# Altium footprint library WR-TBL_Pluggable Connector_5.08mm.PcbLib: 295 footprints (part 8 of 19)
Each footprint in its own frame and in the unit in brackets; x right, y up, seen from the top. Pads: shape width x height; smd on the part's side, far side on the other; paste and mask are expansions set on the pad; w line width, h text height; cw(c..) or ccw(c..) is an arc to the next point about the centre after c.
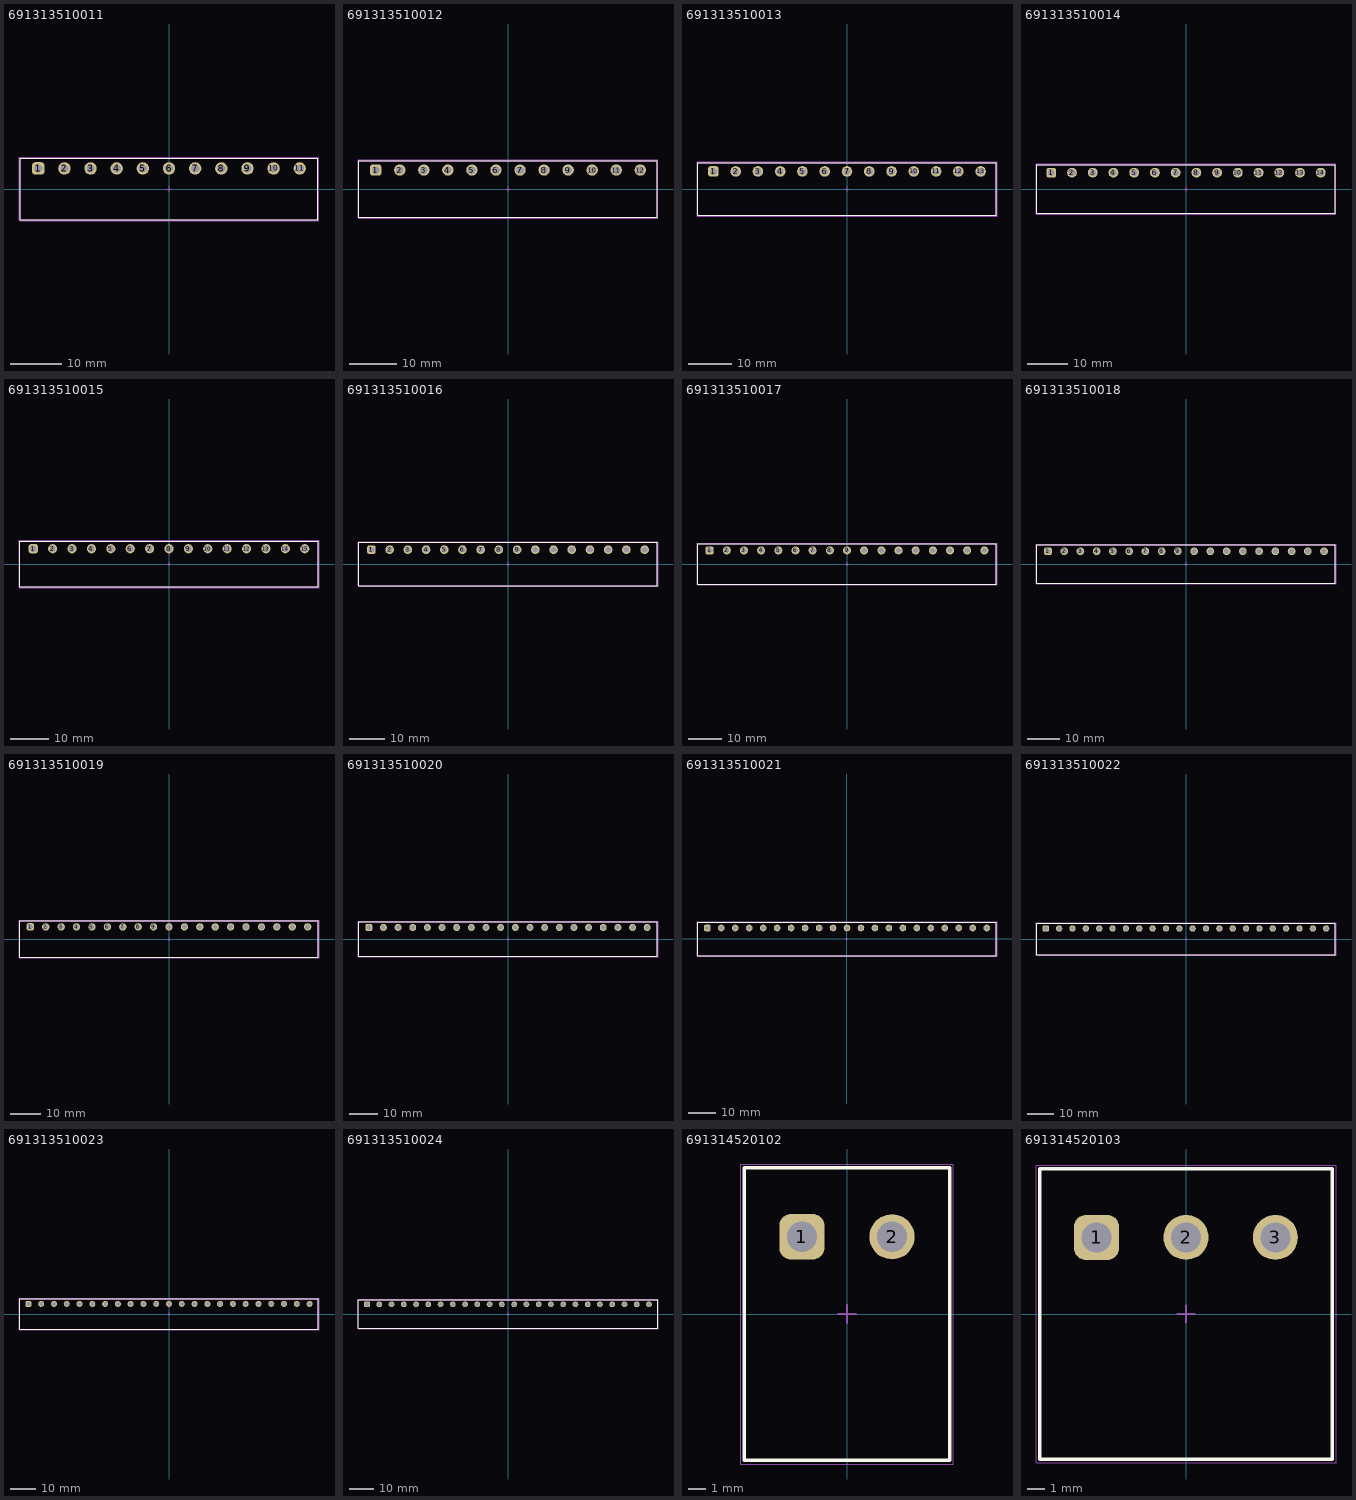
[diagram p7: the footprints below, top view; thin cyan lines are the x and y axes]

## 691313510011 [mm] "5,08mm - PCB Headers - Horizontal - Closed ends - 11p"
height 8.5
pads (11):
  rrect50% 2.4x2.4 hole 1.6: 1(-25.4,4)
  round 2.4 hole 1.6: 2(-20.32,4) 3(-15.24,4) 4(-10.16,4) 5(-5.08,4) 6(0,4) 7(5.08,4) 8(10.16,4) 9(15.24,4) 10(20.32,4) 11(25.4,4)
Top Overlay:
  lines w0.2: -28.94,-6 -28.94,6 28.94,6 28.94,-6 -28.94,-6
Top Assembly:
  lines w0.1: -28.94,-6 28.94,-6 28.94,6 -28.94,6 -28.94,-6
Top Designator:
  text ".Designator" at -3.647,-0.357 h1
Top 3D Body:
  lines w0.1: -28.94,-6 -28.94,6 28.94,6 28.94,-6 -28.94,-6
Top Courtyard:
  lines w0.05: -29.14,-6.2 -29.14,6.2 29.14,6.2 29.14,-6.2 -29.14,-6.2
Top Component Center:
  lines w0.1: -0.5,0 0.5,0 ; 0,-0.5 0,0.5
3D body "691313510011.stp": height 8.55, standoff -3.45, extent -28.94,-6 28.94,6

## 691313510012 [mm] "5,08mm - PCB Headers - Horizontal - Closed ends - 12p"
height 8.5
pads (12):
  rrect50% 2.4x2.4 hole 1.6: 1(-27.94,4)
  round 2.4 hole 1.6: 2(-22.86,4) 3(-17.78,4) 4(-12.7,4) 5(-7.62,4) 6(-2.54,4) 7(2.54,4) 8(7.62,4) 9(12.7,4) 10(17.78,4) 11(22.86,4) 12(27.94,4)
Top Overlay:
  lines w0.2: -31.48,-6 31.48,-6 31.48,6 -31.48,6 -31.48,-6
Top Assembly:
  lines w0.1: -31.48,-6 -31.48,6 31.48,6 31.48,-6 -31.48,-6
Top Designator:
  text ".Designator" at -3.647,-0.357 h1
Top 3D Body:
  lines w0.1: -31.48,-6 31.48,-6 31.48,6 -31.48,6 -31.48,-6
Top Courtyard:
  lines w0.05: -31.68,-6.2 31.68,-6.2 31.68,6.2 -31.68,6.2 -31.68,-6.2
Top Component Center:
  lines w0.1: -0.5,0 0.5,0 ; 0,-0.5 0,0.5
3D body "691313510012.stp": height 8.55, standoff -3.45, extent -31.48,-6 31.48,6

## 691313510013 [mm] "5,08mm - PCB Headers - Horizontal - Closed ends - 13p"
height 8.5
pads (13):
  rrect50% 2.4x2.4 hole 1.6: 1(-30.48,4)
  round 2.4 hole 1.6: 2(-25.4,4) 3(-20.32,4) 4(-15.24,4) 5(-10.16,4) 6(-5.08,4) 7(0,4) 8(5.08,4) 9(10.16,4) 10(15.24,4) 11(20.32,4) 12(25.4,4) 13(30.48,4)
Top Overlay:
  lines w0.2: -34.02,-6 -34.02,6 34.02,6 34.02,-6 -34.02,-6
Top Assembly:
  lines w0.1: -34.02,-6 34.02,-6 34.02,6 -34.02,6 -34.02,-6
Top Designator:
  text ".Designator" at -3.647,-0.357 h1
Top 3D Body:
  lines w0.1: -34.02,-6 -34.02,6 34.02,6 34.02,-6 -34.02,-6
Top Courtyard:
  lines w0.05: -34.22,-6.2 -34.22,6.2 34.22,6.2 34.22,-6.2 -34.22,-6.2
Top Component Center:
  lines w0.1: -0.5,0 0.5,0 ; 0,-0.5 0,0.5
3D body "691313510013.stp": height 8.55, standoff -3.45, extent -34.02,-6 34.02,6

## 691313510014 [mm] "5,08mm - PCB Headers - Horizontal - Closed ends - 14p"
height 8.5
pads (14):
  rrect50% 2.4x2.4 hole 1.6: 1(-33.02,4)
  round 2.4 hole 1.6: 2(-27.94,4) 3(-22.86,4) 4(-17.78,4) 5(-12.7,4) 6(-7.62,4) 7(-2.54,4) 8(2.54,4) 9(7.62,4) 10(12.7,4) 11(17.78,4) 12(22.86,4) 13(27.94,4) 14(33.02,4)
Top Overlay:
  lines w0.2: -36.56,-6 36.56,-6 36.56,6 -36.56,6 -36.56,-6
Top Assembly:
  lines w0.1: -36.56,-6 -36.56,6 36.56,6 36.56,-6 -36.56,-6
Top Designator:
  text ".Designator" at -3.647,-0.357 h1
Top 3D Body:
  lines w0.1: -36.56,-6 36.56,-6 36.56,6 -36.56,6 -36.56,-6
Top Courtyard:
  lines w0.05: -36.76,-6.2 36.76,-6.2 36.76,6.2 -36.76,6.2 -36.76,-6.2
Top Component Center:
  lines w0.1: -0.5,0 0.5,0 ; 0,-0.5 0,0.5
3D body "691313510014.stp": height 8.55, standoff -3.45, extent -36.56,-6 36.56,6

## 691313510015 [mm] "5,08mm - PCB Headers - Horizontal - Closed ends - 15p"
height 8.5
pads (15):
  rrect50% 2.4x2.4 hole 1.6: 1(-35.56,4)
  round 2.4 hole 1.6: 2(-30.48,4) 3(-25.4,4) 4(-20.32,4) 5(-15.24,4) 6(-10.16,4) 7(-5.08,4) 8(0,4) 9(5.08,4) 10(10.16,4) 11(15.24,4) 12(20.32,4) 13(25.4,4) 14(30.48,4) 15(35.56,4)
Top Overlay:
  lines w0.2: -39.1,-6 39.1,-6 39.1,6 -39.1,6 -39.1,-6
Top Assembly:
  lines w0.1: -39.1,-6 -39.1,6 39.1,6 39.1,-6 -39.1,-6
Top Designator:
  text ".Designator" at -3.647,-0.357 h1
Top 3D Body:
  lines w0.1: -39.1,-6 39.1,-6 39.1,6 -39.1,6 -39.1,-6
Top Courtyard:
  lines w0.05: -39.3,-6.2 39.3,-6.2 39.3,6.2 -39.3,6.2 -39.3,-6.2
Top Component Center:
  lines w0.1: -0.5,0 0.5,0 ; 0,-0.5 0,0.5
3D body "691313510015.stp": height 8.55, standoff -3.45, extent -39.1,-6 39.1,6

## 691313510016 [mm] "5,08mm - PCB Headers - Horizontal - Closed ends - 16p"
height 8.5
pads (16):
  rrect50% 2.4x2.4 hole 1.6: 1(-38.1,4)
  round 2.4 hole 1.6: 2(-33.02,4) 3(-27.94,4) 4(-22.86,4) 5(-17.78,4) 6(-12.7,4) 7(-7.62,4) 8(-2.54,4) 9(2.54,4) 10(7.62,4) 11(12.7,4) 12(17.78,4) 13(22.86,4) 14(27.94,4) 15(33.02,4) 16(38.1,4)
Top Overlay:
  lines w0.2: -41.64,-6 41.64,-6 41.64,6 -41.64,6 -41.64,-6
Top Assembly:
  lines w0.1: -41.64,-6 -41.64,6 41.64,6 41.64,-6 -41.64,-6
Top Designator:
  text ".Designator" at -3.647,-0.357 h1
Top 3D Body:
  lines w0.1: -41.64,-6 41.64,-6 41.64,6 -41.64,6 -41.64,-6
Top Courtyard:
  lines w0.05: -41.84,-6.2 41.84,-6.2 41.84,6.2 -41.84,6.2 -41.84,-6.2
Top Component Center:
  lines w0.1: -0.5,0 0.5,0 ; 0,-0.5 0,0.5
3D body "691313510016.stp": height 8.55, standoff -3.45, extent -41.64,-6 41.64,6

## 691313510017 [mm] "5,08mm - PCB Headers - Horizontal - Closed ends - 17p"
height 8.5
pads (17):
  rrect50% 2.4x2.4 hole 1.6: 1(-40.64,4)
  round 2.4 hole 1.6: 2(-35.56,4) 3(-30.48,4) 4(-25.4,4) 5(-20.32,4) 6(-15.24,4) 7(-10.16,4) 8(-5.08,4) 9(0,4) 10(5.08,4) 11(10.16,4) 12(15.24,4) 13(20.32,4) 14(25.4,4) 15(30.48,4) 16(35.56,4) 17(40.64,4)
Top Overlay:
  lines w0.2: -44.18,-6 -44.18,6 44.18,6 44.18,-6 -44.18,-6
Top Assembly:
  lines w0.1: -44.18,-6 44.18,-6 44.18,6 -44.18,6 -44.18,-6
Top Designator:
  text ".Designator" at -3.647,-0.357 h1
Top 3D Body:
  lines w0.1: -44.18,-6 -44.18,6 44.18,6 44.18,-6 -44.18,-6
Top Courtyard:
  lines w0.05: -44.38,-6.2 -44.38,6.2 44.38,6.2 44.38,-6.2 -44.38,-6.2
Top Component Center:
  lines w0.1: -0.5,0 0.5,0 ; 0,-0.5 0,0.5
3D body "691313510017.stp": height 8.55, standoff -3.45, extent -44.18,-6 44.18,6

## 691313510018 [mm] "5,08mm - PCB Headers - Horizontal - Closed ends - 18p"
height 8.5
pads (18):
  rrect50% 2.4x2.4 hole 1.6: 1(-43.18,4)
  round 2.4 hole 1.6: 2(-38.1,4) 3(-33.02,4) 4(-27.94,4) 5(-22.86,4) 6(-17.78,4) 7(-12.7,4) 8(-7.62,4) 9(-2.54,4) 10(2.54,4) 11(7.62,4) 12(12.7,4) 13(17.78,4) 14(22.86,4) 15(27.94,4) 16(33.02,4) 17(38.1,4) 18(43.18,4)
Top Overlay:
  lines w0.2: -46.72,-6 -46.72,6 46.72,6 46.72,-6 -46.72,-6
Top Assembly:
  lines w0.1: -46.72,-6 46.72,-6 46.72,6 -46.72,6 -46.72,-6
Top Designator:
  text ".Designator" at -3.647,-0.357 h1
Top 3D Body:
  lines w0.1: -46.72,-6 -46.72,6 46.72,6 46.72,-6 -46.72,-6
Top Courtyard:
  lines w0.05: -46.92,-6.2 -46.92,6.2 46.92,6.2 46.92,-6.2 -46.92,-6.2
Top Component Center:
  lines w0.1: -0.5,0 0.5,0 ; 0,-0.5 0,0.5
3D body "691313510018.stp": height 8.55, standoff -3.45, extent -46.72,-6 46.72,6

## 691313510019 [mm] "5,08mm - PCB Headers - Horizontal - Closed ends - 19p"
height 8.5
pads (19):
  rrect50% 2.4x2.4 hole 1.6: 1(-45.72,4)
  round 2.4 hole 1.6: 2(-40.64,4) 3(-35.56,4) 4(-30.48,4) 5(-25.4,4) 6(-20.32,4) 7(-15.24,4) 8(-10.16,4) 9(-5.08,4) 10(0,4) 11(5.08,4) 12(10.16,4) 13(15.24,4) 14(20.32,4) 15(25.4,4) 16(30.48,4) 17(35.56,4) 18(40.64,4) 19(45.72,4)
Top Overlay:
  lines w0.2: -49.26,-6 -49.26,6 49.26,6 49.26,-6 -49.26,-6
Top Assembly:
  lines w0.1: -49.26,-6 49.26,-6 49.26,6 -49.26,6 -49.26,-6
Top Designator:
  text ".Designator" at -3.647,-0.357 h1
Top 3D Body:
  lines w0.1: -49.26,-6 -49.26,6 49.26,6 49.26,-6 -49.26,-6
Top Courtyard:
  lines w0.05: -49.46,-6.2 -49.46,6.2 49.46,6.2 49.46,-6.2 -49.46,-6.2
Top Component Center:
  lines w0.1: -0.5,0 0.5,0 ; 0,-0.5 0,0.5
3D body "691313510019.stp": height 8.55, standoff -3.45, extent -49.26,-6 49.26,6

## 691313510020 [mm] "5,08mm - PCB Headers - Horizontal - Closed ends - 20p"
height 8.5
pads (20):
  rrect50% 2.4x2.4 hole 1.6: 1(-48.26,4)
  round 2.4 hole 1.6: 2(-43.18,4) 3(-38.1,4) 4(-33.02,4) 5(-27.94,4) 6(-22.86,4) 7(-17.78,4) 8(-12.7,4) 9(-7.62,4) 10(-2.54,4) 11(2.54,4) 12(7.62,4) 13(12.7,4) 14(17.78,4) 15(22.86,4) 16(27.94,4) 17(33.02,4) 18(38.1,4) 19(43.18,4) 20(48.26,4)
Top Overlay:
  lines w0.2: -51.8,-6 -51.8,6 51.8,6 51.8,-6 -51.8,-6
Top Assembly:
  lines w0.1: -51.8,-6 51.8,-6 51.8,6 -51.8,6 -51.8,-6
Top Designator:
  text ".Designator" at -3.647,-0.357 h1
Top 3D Body:
  lines w0.1: -51.8,-6 -51.8,6 51.8,6 51.8,-6 -51.8,-6
Top Courtyard:
  lines w0.05: -52,-6.2 -52,6.2 52,6.2 52,-6.2 -52,-6.2
Top Component Center:
  lines w0.1: -0.5,0 0.5,0 ; 0,-0.5 0,0.5
3D body "691313510020.stp": height 8.55, standoff -3.45, extent -51.8,-6 51.8,6

## 691313510021 [mm] "5,08mm - PCB Headers - Horizontal - Closed ends - 21p"
height 8.5
pads (21):
  rrect50% 2.4x2.4 hole 1.6: 1(-50.8,4)
  round 2.4 hole 1.6: 2(-45.72,4) 3(-40.64,4) 4(-35.56,4) 5(-30.48,4) 6(-25.4,4) 7(-20.32,4) 8(-15.24,4) 9(-10.16,4) 10(-5.08,4) 11(0,4) 12(5.08,4) 13(10.16,4) 14(15.24,4) 15(20.32,4) 16(25.4,4) 17(30.48,4) 18(35.56,4) 19(40.64,4) 20(45.72,4) 21(50.8,4)
Top Overlay:
  lines w0.2: -54.34,-6 54.34,-6 54.34,6 -54.34,6 -54.34,-6
Top Assembly:
  lines w0.1: -54.34,-6 -54.34,6 54.34,6 54.34,-6 -54.34,-6
Top Designator:
  text ".Designator" at -3.647,-0.357 h1
Top 3D Body:
  lines w0.1: -54.34,-6 54.34,-6 54.34,6 -54.34,6 -54.34,-6
Top Courtyard:
  lines w0.05: -54.54,-6.2 54.54,-6.2 54.54,6.2 -54.54,6.2 -54.54,-6.2
Top Component Center:
  lines w0.1: -0.5,0 0.5,0 ; 0,-0.5 0,0.5
3D body "691313510021.stp": height 8.55, standoff -3.45, extent -54.34,-6 54.34,6

## 691313510022 [mm] "5,08mm - PCB Headers - Horizontal - Closed ends - 22p"
height 8.5
pads (22):
  rrect50% 2.4x2.4 hole 1.6: 1(-53.34,4)
  round 2.4 hole 1.6: 2(-48.26,4) 3(-43.18,4) 4(-38.1,4) 5(-33.02,4) 6(-27.94,4) 7(-22.86,4) 8(-17.78,4) 9(-12.7,4) 10(-7.62,4) 11(-2.54,4) 12(2.54,4) 13(7.62,4) 14(12.7,4) 15(17.78,4) 16(22.86,4) 17(27.94,4) 18(33.02,4) 19(38.1,4) 20(43.18,4) 21(48.26,4) 22(53.34,4)
Top Overlay:
  lines w0.2: -56.88,-6 -56.88,6 56.88,6 56.88,-6 -56.88,-6
Top Assembly:
  lines w0.1: -56.88,-6 56.88,-6 56.88,6 -56.88,6 -56.88,-6
Top Designator:
  text ".Designator" at -3.647,-0.357 h1
Top 3D Body:
  lines w0.1: -56.88,-6 -56.88,6 56.88,6 56.88,-6 -56.88,-6
Top Courtyard:
  lines w0.05: -57.08,-6.2 -57.08,6.2 57.08,6.2 57.08,-6.2 -57.08,-6.2
Top Component Center:
  lines w0.1: -0.5,0 0.5,0 ; 0,-0.5 0,0.5
3D body "691313510022.stp": height 8.55, standoff -3.45, extent -56.88,-6 56.88,6

## 691313510023 [mm] "5,08mm - PCB Headers - Horizontal - Closed ends -23p"
height 8.5
pads (23):
  rrect50% 2.4x2.4 hole 1.6: 1(-55.88,4)
  round 2.4 hole 1.6: 2(-50.8,4) 3(-45.72,4) 4(-40.64,4) 5(-35.56,4) 6(-30.48,4) 7(-25.4,4) 8(-20.32,4) 9(-15.24,4) 10(-10.16,4) 11(-5.08,4) 12(0,4) 13(5.08,4) 14(10.16,4) 15(15.24,4) 16(20.32,4) 17(25.4,4) 18(30.48,4) 19(35.56,4) 20(40.64,4) 21(45.72,4) 22(50.8,4) 23(55.88,4)
Top Overlay:
  lines w0.2: -59.42,-6 59.42,-6 59.42,6 -59.42,6 -59.42,-6
Top Assembly:
  lines w0.1: -59.42,-6 -59.42,6 59.42,6 59.42,-6 -59.42,-6
Top Designator:
  text ".Designator" at -3.647,-0.357 h1
Top 3D Body:
  lines w0.1: -59.42,-6 59.42,-6 59.42,6 -59.42,6 -59.42,-6
Top Courtyard:
  lines w0.05: -59.62,-6.2 59.62,-6.2 59.62,6.2 -59.62,6.2 -59.62,-6.2
Top Component Center:
  lines w0.1: -0.5,0 0.5,0 ; 0,-0.5 0,0.5
3D body "691313510023.stp": height 8.55, standoff -3.45, extent -59.42,-6 59.42,6

## 691313510024 [mm] "5,08mm - PCB Headers - Horizontal - Closed ends - 24p"
height 8.5
pads (24):
  rrect50% 2.4x2.4 hole 1.6: 1(-58.42,4)
  round 2.4 hole 1.6: 2(-53.34,4) 3(-48.26,4) 4(-43.18,4) 5(-38.1,4) 6(-33.02,4) 7(-27.94,4) 8(-22.86,4) 9(-17.78,4) 10(-12.7,4) 11(-7.62,4) 12(-2.54,4) 13(2.54,4) 14(7.62,4) 15(12.7,4) 16(17.78,4) 17(22.86,4) 18(27.94,4) 19(33.02,4) 20(38.1,4) 21(43.18,4) 22(48.26,4) 23(53.34,4) 24(58.42,4)
Top Overlay:
  lines w0.2: -61.96,-6 61.96,-6 61.96,6 -61.96,6 -61.96,-6
Top Assembly:
  lines w0.1: -61.96,-6 -61.96,6 61.96,6 61.96,-6 -61.96,-6
Top Designator:
  text ".Designator" at -3.647,-0.357 h1
Top 3D Body:
  lines w0.1: -61.96,-6 61.96,-6 61.96,6 -61.96,6 -61.96,-6
Top Courtyard:
  lines w0.05: -62.16,-6.2 62.16,-6.2 62.16,6.2 -62.16,6.2 -62.16,-6.2
Top Component Center:
  lines w0.1: -0.5,0 0.5,0 ; 0,-0.5 0,0.5
3D body "691313510024.stp": height 8.55, standoff -3.45, extent -61.96,-6 61.96,6

## 691314520102 [mm] "5,08mm - PCB Headers - 45¡ã- 02p"
height 14.5
pads (2):
  rrect50% 2.55x2.55 hole 1.7: 1(-2.54,4.35)
  round 2.55 hole 1.7: 2(2.54,4.35)
Top Overlay:
  lines w0.2: -5.78,-8.25 5.78,-8.25 5.78,8.25 -5.78,8.25 -5.78,-8.25
Top Assembly:
  lines w0.1: -5.78,-8.25 -5.78,8.25 5.78,8.25 5.78,-8.25 -5.78,-8.25
Top Designator:
  text ".Designator" at -3.647,-0.357 h1
Top 3D Body:
  lines w0.1: -5.78,-8.25 5.78,-8.25 5.78,8.25 -5.78,8.25 -5.78,-8.25
Top Courtyard:
  lines w0.05: -5.98,-8.45 -5.98,8.45 5.98,8.45 5.98,-8.45 -5.98,-8.45
Top Component Center:
  lines w0.1: -0.5,0 0.5,0 ; 0,-0.5 0,0.5
3D body "691314520102.stp": height 14.55, standoff -4.05, extent -5.78,-8.25 5.78,8.25

## 691314520103 [mm] "5,08mm - PCB Headers - 45¡ã- 03p"
height 14.5
pads (3):
  rrect50% 2.55x2.55 hole 1.7: 1(-5.08,4.35)
  round 2.55 hole 1.7: 2(0,4.35) 3(5.08,4.35)
Top Overlay:
  lines w0.2: -8.32,-8.25 -8.32,8.25 8.32,8.25 8.32,-8.25 -8.32,-8.25
Top Assembly:
  lines w0.1: -8.32,-8.25 8.32,-8.25 8.32,8.25 -8.32,8.25 -8.32,-8.25
Top Designator:
  text ".Designator" at -3.647,-0.357 h1
Top 3D Body:
  lines w0.1: -8.32,-8.25 -8.32,8.25 8.32,8.25 8.32,-8.25 -8.32,-8.25
Top Courtyard:
  lines w0.05: -8.52,-8.45 8.52,-8.45 8.52,8.45 -8.52,8.45 -8.52,-8.45
Top Component Center:
  lines w0.1: -0.5,0 0.5,0 ; 0,-0.5 0,0.5
3D body "691314520103.stp": height 14.55, standoff -4.05, extent -8.32,-8.25 8.32,8.25